# Altium schematic symbol library RELAY-HLS8L-DC5V-S-C(5P-19X15MM).SchLib: 1 symbol
Pins are listed as number, name and electrical type; pins without a type are passive.

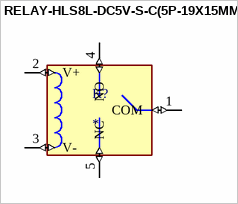
[diagram p0: symbol RELAY-HLS8L-DC5V-S-C(5P-19X15MM)]

## RELAY-HLS8L-DC5V-S-C(5P-19X15MM)
designator K?
DIP Power Relay 5V-7A;; MF: Helishun; MP: HLS8L-DC5V-S-C; SnapEDA_Link: https://www.snapeda.com/parts/HLS8L-DC5V-S-C/Helishun/view-part/?ref=snap; Package: None; Value: *; Check_prices: https://www.snapeda.com/parts/HLS8L-DC5V-S-C/Helishun/view-part/?ref=eda
footprint REY5-19.0X15.0X15.0MM
pins: 1 COM (io), 2 V+ (io), 3 V- (io), 4 NO (io), 5 NC (io)